# Altium footprint library PBL - SMD Packages.PcbLib: 148 footprints (part 8 of 10)
Each footprint in its own frame and in the unit in brackets; x right, y up, seen from the top. Pads: shape width x height; smd on the part's side, far side on the other; paste and mask are expansions set on the pad; w line width, h text height; cw(c..) or ccw(c..) is an arc to the next point about the centre after c.
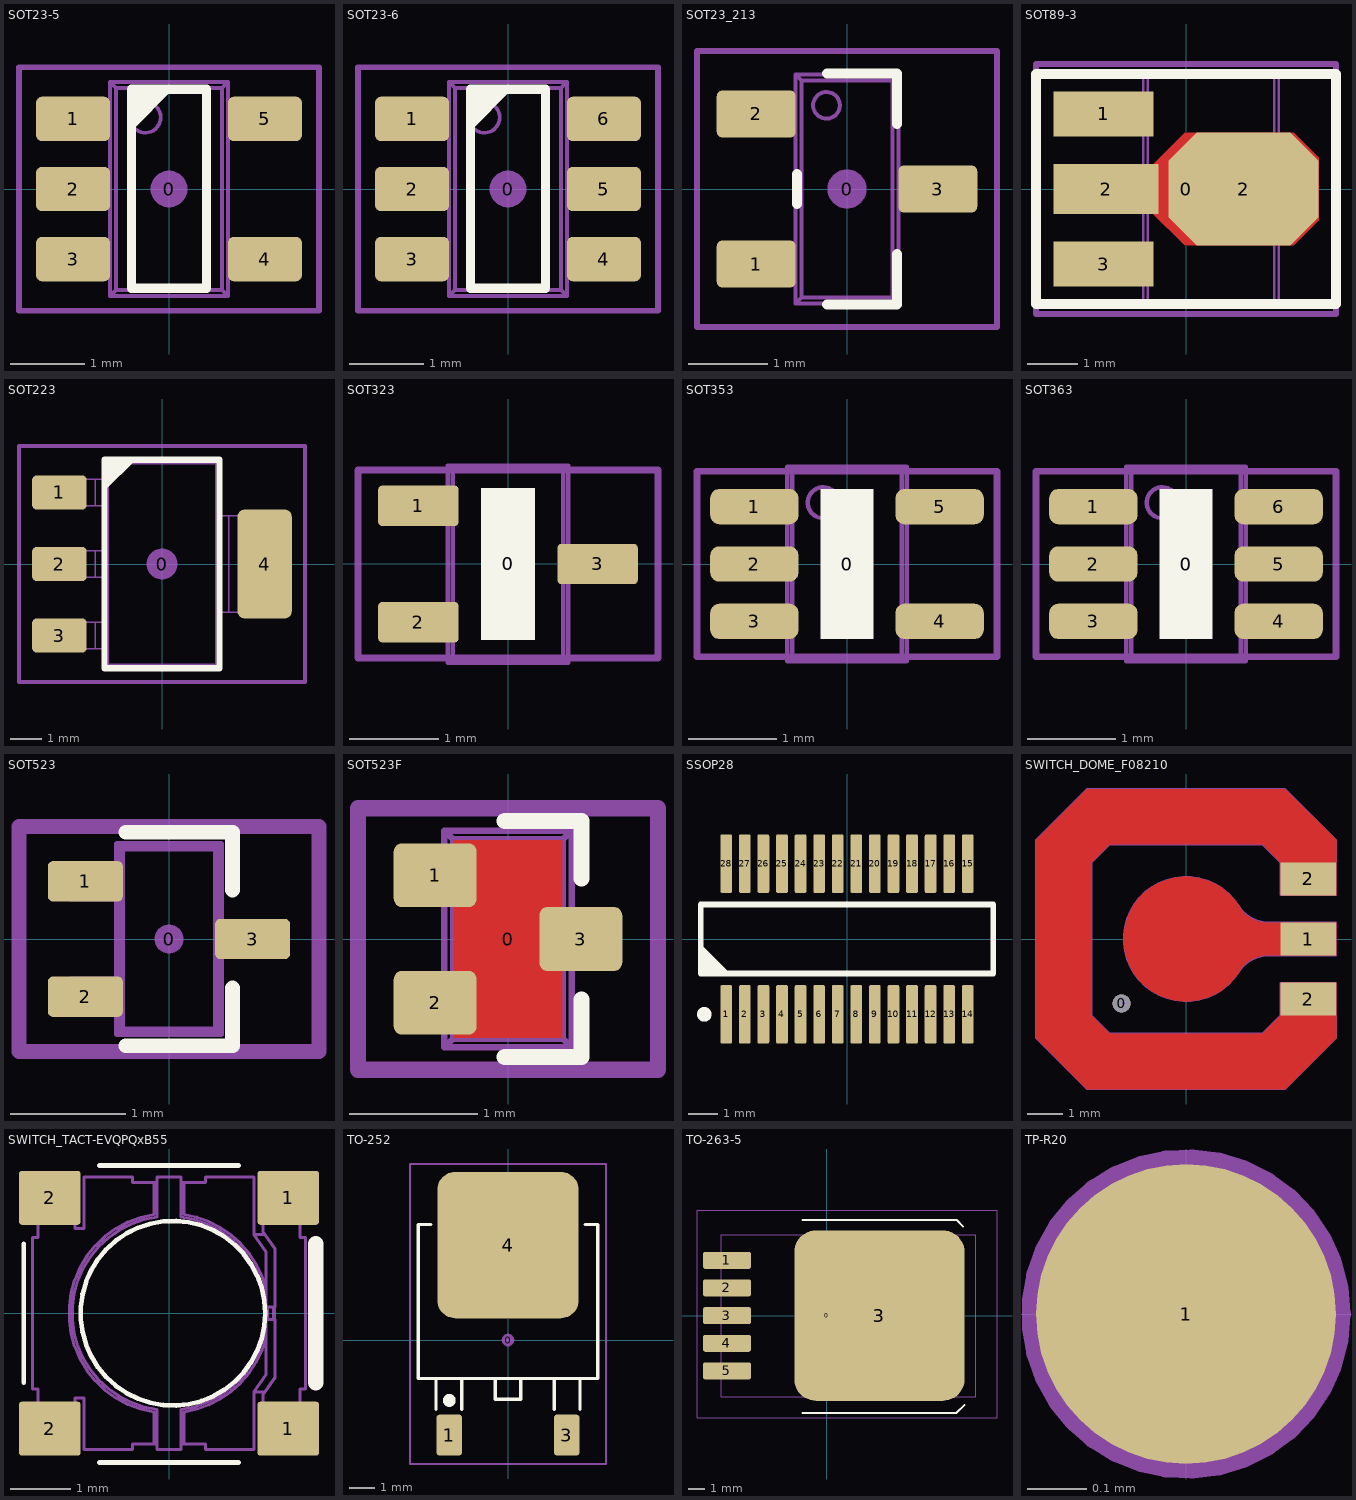
[diagram p7: the footprints below, top view; thin cyan lines are the x and y axes]

## SOT23-5 [mm]
height 1.6
pads (6):
  round 0.5 on Mech15: 0(0,0)
  rrect25% 1x0.6 smd: 1(-1.3,0.95) 2(-1.3,0) 3(-1.3,-0.95) 4(1.3,-0.95) 5(1.3,0.95)
Top Overlay:
  region: -0.508,1.353 0.053,1.353 -0.508,0.792
  lines w0.127: -0.508,-1.347 -0.508,1.353 0.508,1.353 0.508,-1.347 -0.508,-1.347
  text "." at -2.275,0.95 h0.1
13 - 3D Top Side:
  circle w0.05: c-0.32,0.97 r0.208
  lines w0.05: -1.191,-1.15 -1.191,-0.75 ; -1.191,-0.2 -1.191,0.2 ; -1.191,0.75 -1.191,1.15 ; -1.1,-1.15 -1.1,-0.75 ; -1.1,-0.2 -1.1,0.2 ; -1.1,0.75 -1.1,1.15 ; -1.094,-1.15 -1.094,-0.75 ; -1.094,-0.2 -1.094,0.2 ; -1.094,0.75 -1.094,1.15 ; -0.844,-1.15 -0.844,-0.75 ; -0.844,-0.2 -0.844,0.2 ; -0.844,0.75 -0.844,1.15 ; -0.8,-1.15 -1.4,-1.15 -1.4,-0.75 -0.8,-0.75 ; -0.8,-0.2 -1.4,-0.2 -1.4,0.2 -0.8,0.2 ; -0.8,0.75 -1.4,0.75 -1.4,1.15 -0.8,1.15 ; 0.8,-1.15 1.4,-1.15 1.4,-0.75 0.8,-0.75 ; 0.8,0.75 1.4,0.75 1.4,1.15 0.8,1.15 ; 0.844,-1.15 0.844,-0.75 ; 0.844,0.75 0.844,1.15 ; 1.094,-1.15 1.094,-0.75 ; 1.094,0.75 1.094,1.15 ; 1.1,-1.15 1.1,-0.75 ; 1.1,0.75 1.1,1.15 ; 1.191,-1.15 1.191,-0.75 ; 1.191,0.75 1.191,1.15 ; -0.8,-1.45 -0.8,1.45 ; -0.8,-1.45 -0.719,-1.369 ; -0.8,-1.45 0.8,-1.45 ; -0.8,1.45 -0.719,1.369 ; -0.8,1.45 0.8,1.45 ; -0.719,-1.369 0.719,-1.369 ; -0.719,-1.369 -0.719,1.369 ; -0.719,1.369 0.719,1.369 ; 0.719,-1.369 0.8,-1.45 ; 0.719,-1.369 0.719,1.369 ; 0.719,1.369 0.8,1.45 ; 0.8,-1.45 0.8,1.45
15 - Top Courtyards:
  lines w0.076: -2.032,-1.651 -2.032,1.651 2.032,1.651 2.032,-1.651 -2.032,-1.651
3D body: height 1.44, standoff -0.01, extent -1.4,-1.45 1.4,1.45

## SOT23-6 [mm]
height 1.6
pads (7):
  round 0.5 on Mech15: 0(0,0)
  rrect25% 1x0.6 smd: 1(-1.3,0.95) 2(-1.3,0) 3(-1.3,-0.95) 4(1.3,-0.95) 5(1.3,0) 6(1.3,0.95)
Top Overlay:
  region: -0.508,1.353 0.053,1.353 -0.508,0.792
  lines w0.127: -0.508,-1.347 -0.508,1.353 0.508,1.353 0.508,-1.347 -0.508,-1.347
  text "." at -2.275,0.95 h0.1
13 - 3D Top Side:
  circle w0.05: c-0.32,0.97 r0.208
  lines w0.05: -1.191,-1.15 -1.191,-0.75 ; -1.191,-0.2 -1.191,0.2 ; -1.191,0.75 -1.191,1.15 ; -1.1,-1.15 -1.1,-0.75 ; -1.1,-0.2 -1.1,0.2 ; -1.1,0.75 -1.1,1.15 ; -1.094,-1.15 -1.094,-0.75 ; -1.094,-0.2 -1.094,0.2 ; -1.094,0.75 -1.094,1.15 ; -0.844,-1.15 -0.844,-0.75 ; -0.844,-0.2 -0.844,0.2 ; -0.844,0.75 -0.844,1.15 ; -0.8,-1.15 -1.4,-1.15 -1.4,-0.75 -0.8,-0.75 ; -0.8,-0.2 -1.4,-0.2 -1.4,0.2 -0.8,0.2 ; -0.8,0.75 -1.4,0.75 -1.4,1.15 -0.8,1.15 ; 0.8,-1.15 1.4,-1.15 1.4,-0.75 0.8,-0.75 ; 0.8,-0.2 1.4,-0.2 1.4,0.2 0.8,0.2 ; 0.8,0.75 1.4,0.75 1.4,1.15 0.8,1.15 ; 0.844,-1.15 0.844,-0.75 ; 0.844,-0.2 0.844,0.2 ; 0.844,0.75 0.844,1.15 ; 1.094,-1.15 1.094,-0.75 ; 1.094,-0.2 1.094,0.2 ; 1.094,0.75 1.094,1.15 ; 1.1,-1.15 1.1,-0.75 ; 1.1,-0.2 1.1,0.2 ; 1.1,0.75 1.1,1.15 ; 1.191,-1.15 1.191,-0.75 ; 1.191,-0.2 1.191,0.2 ; 1.191,0.75 1.191,1.15 ; -0.8,-1.45 0.8,-1.45 ; -0.8,-1.45 -0.719,-1.369 ; -0.8,-1.45 -0.8,1.45 ; -0.8,1.45 0.8,1.45 ; -0.8,1.45 -0.719,1.369 ; -0.719,-1.369 -0.719,1.369 ; -0.719,-1.369 0.719,-1.369 ; -0.719,1.369 0.719,1.369 ; 0.719,-1.369 0.719,1.369 ; 0.719,-1.369 0.8,-1.45 ; 0.719,1.369 0.8,1.45 ; 0.8,-1.45 0.8,1.45
15 - Top Courtyards:
  lines w0.076: -2.032,-1.651 -2.032,1.651 2.032,1.651 2.032,-1.651 -2.032,-1.651
3D body: height 1.44, standoff -0.01, extent -1.4,-1.45 1.4,1.45

## SOT23_213 [mm]
height 1.003
pads (4):
  round 0.5 on Mech15: 0(0,0)
  rrect25% 1x0.6 smd: 1(-1.15,-0.95) 2(-1.15,0.95) 3(1.15,0)
Top Overlay:
  lines w0.127: -0.635,-0.191 -0.635,0.191 ; -0.254,-1.46 0.635,-1.46 0.635,-0.826 ; -0.254,1.46 0.635,1.46 0.635,0.826
13 - 3D Top Side:
  circle w0.05: c-0.26,1.06 r0.169
  lines w0.05: -1.19,-1.19 -1.19,-0.71 ; -1.19,0.71 -1.19,1.19 ; -1.099,-1.19 -1.099,-0.71 ; -1.099,0.71 -1.099,1.19 ; -1.074,-1.19 -1.074,-0.71 ; -1.074,0.71 -1.074,1.19 ; -0.825,-1.19 -0.825,-0.71 ; -0.825,0.71 -0.825,1.19 ; -0.65,-1.19 -1.4,-1.19 -1.4,-0.71 -0.65,-0.71 ; -0.65,0.71 -1.4,0.71 -1.4,1.19 -0.65,1.19 ; 0.65,-0.24 1.4,-0.24 1.4,0.24 0.65,0.24 ; 0.825,-0.24 0.825,0.24 ; 1.074,-0.24 1.074,0.24 ; 1.099,-0.24 1.099,0.24 ; 1.19,-0.24 1.19,0.24 ; -0.65,-1.45 -0.576,-1.376 ; -0.65,-1.45 -0.65,1.45 ; -0.65,-1.45 0.65,-1.45 ; -0.65,1.45 0.65,1.45 ; -0.65,1.45 -0.576,1.376 ; -0.576,-1.376 -0.576,1.376 ; -0.576,-1.376 0.576,-1.376 ; -0.576,1.376 0.576,1.376 ; 0.576,-1.376 0.576,1.376 ; 0.576,-1.376 0.65,-1.45 ; 0.576,1.376 0.65,1.45 ; 0.65,-1.45 0.65,1.45
15 - Top Courtyards:
  lines w0.076: -1.9,-1.75 -1.9,1.75 1.9,1.75 1.9,-1.75 -1.9,-1.75
3D body: height 1.29, standoff -0.01, extent -1.4,-1.45 1.4,1.45

## SOT89-3 [mm] "JEDEC TO-243 option AA / SOT89"
height 1.7
pads (5):
  round 1 on Mech15: 0(0,0)
  rrect1% 2x0.9 smd: 1(-1.65,1.5) 3(-1.65,-1.5)
  rrect1% 2.1x1 smd: 2(-1.6,0)
  oct 3x2.25 smd: 2(1.15,0)
Top Layer:
  region: -0.7,-0.45 -0.025,-1.125 2.15,-1.125 2.65,-0.625 2.65,0.625 2.15,1.125 -0.025,1.125 -0.7,0.45
Top Overlay:
  lines w0.2: -3,-2.3 -3,2.3 3,2.3 3,-2.3 -3,-2.3
13 - 3D Top Side:
  lines w0.05: -0.85,-1.76 -0.85,-2.35 ; -0.85,-1.24 -0.85,-0.3 ; -0.85,0.3 -0.85,1.24 ; -0.85,1.76 -0.85,2.35 ; 1.85,-0.925 1.85,-2.35 ; 1.85,0.925 1.85,2.35 ; -0.85,-2.35 1.85,-2.35 ; -0.85,-2.35 -0.761,-2.261 ; -0.85,2.35 1.85,2.35 ; -0.85,2.35 -0.761,2.261 ; -0.761,-2.261 1.761,-2.261 ; -0.761,-2.261 -0.761,2.261 ; -0.761,2.261 1.761,2.261 ; 1.761,-2.261 1.761,2.261 ; 1.761,-2.261 1.85,-2.35 ; 1.761,2.261 1.85,2.35 ; -2.25,-1.76 -2.25,-1.24 -0.824,-1.24 -0.824,-1.76 -2.25,-1.76 ; -2.25,-0.3 -0.824,-0.3 -0.824,0.3 -2.25,0.3 -2.25,-0.3 ; -2.25,1.24 -2.25,1.76 -0.824,1.76 -0.824,1.24 -2.25,1.24 ; 1.824,-0.925 1.9,-0.925 2.2,-0.625 2.2,0.625 1.9,0.925 1.824,0.925 1.824,-0.925
15 - Top Courtyards:
  lines w0.127: -3,-2.5 -3,2.5 3,2.5 3,-2.5 -3,-2.5
3D body: height 1.69, standoff 0, extent -2.25,-2.35 2.2,2.35

## SOT223 [mm] "SOT223 /SC-73"
height 1.524
pads (5):
  round 1 on Mech15: 0(0,0)
  rrect25% 1.75x1.1 smd: 1(-3.3,2.3) 2(-3.3,0) 3(-3.3,-2.3)
  rrect25% 1.75x3.5 smd: 4(3.3,0)
Top Overlay:
  region: -1.85,3.35 -0.85,3.35 -1.85,2.35
  lines w0.2: -1.85,-3.35 1.85,-3.35 1.85,3.35 -1.85,3.35 -1.85,-3.35
13 - 3D Top Side:
  lines w0.05: -3.186,-2.72 -3.186,-1.88 ; -3.186,-0.42 -3.186,0.42 ; -3.186,1.88 -3.186,2.72 ; -3.062,-2.72 -3.062,-1.88 ; -3.062,-0.42 -3.062,0.42 ; -3.062,1.88 -3.062,2.72 ; -2.506,-2.72 -2.506,-1.88 ; -2.506,-0.42 -2.506,0.42 ; -2.506,1.88 -2.506,2.72 ; -2.152,-2.72 -2.152,-1.88 ; -2.152,-0.42 -2.152,0.42 ; -2.152,1.88 -2.152,2.72 ; -1.85,-2.72 -1.85,-3.35 ; -1.85,-1.88 -1.85,-0.42 ; -1.85,0.42 -1.85,1.88 ; -1.85,2.72 -1.85,3.35 ; 1.85,-1.55 1.85,-3.35 ; 1.85,1.55 1.85,3.35 ; 2.152,-1.55 2.152,1.55 ; 2.506,-1.55 2.506,1.55 ; 3.062,-1.55 3.062,1.55 ; 3.186,-1.55 3.186,1.55 ; -1.85,-3.35 1.85,-3.35 ; -1.85,-3.35 -1.731,-3.231 ; -1.85,3.35 1.85,3.35 ; -1.85,3.35 -1.731,3.231 ; -1.731,-3.231 -1.731,3.231 ; -1.731,-3.231 1.731,-3.231 ; -1.731,3.231 1.731,3.231 ; 1.731,-3.231 1.731,3.231 ; 1.731,-3.231 1.85,-3.35 ; 1.731,3.231 1.85,3.35 ; -3.65,-2.72 -1.829,-2.72 -1.829,-1.88 -3.65,-1.88 -3.65,-2.72 ; -3.65,-0.42 -1.829,-0.42 -1.829,0.42 -3.65,0.42 -3.65,-0.42 ; -3.65,1.88 -1.829,1.88 -1.829,2.72 -3.65,2.72 -3.65,1.88 ; 1.829,-1.55 1.829,1.55 3.65,1.55 3.65,-1.55 1.829,-1.55
15 - Top Courtyards:
  lines w0.127: -4.6,-3.8 4.6,-3.8 4.6,3.8 -4.6,3.8 -4.6,-3.8
3D body: height 1.8, standoff 0, extent -3.65,-3.35 3.65,3.35

## SOT323 [mm] "Small outline 2.1mm L x 1.25mm W x 1.1mm H; 3 lead SC70, EIAJ SC-70, SOT323"
height 1.1
pads (4):
  round 0.5 on Mech15: 0(0,0)
  rrect20% 0.9x0.45 smd: 1(-1,0.65) 2(-1,-0.65) 3(1,0)
Top Overlay:
  rectangle: -0.3,-0.85 0.3,0.85
  text "." at -1.875,0.65 h0.1
13 - 3D Top Side:
  lines w0.05: -1.028,-0.8 -1.028,-0.5 ; -1.028,0.5 -1.028,0.8 ; -0.937,-0.8 -0.937,-0.5 ; -0.937,0.5 -0.937,0.8 ; -0.925,-0.8 -0.925,-0.5 ; -0.925,0.5 -0.925,0.8 ; 0.925,-0.15 0.925,0.15 ; 0.937,-0.15 0.937,0.15 ; 1.028,-0.15 1.028,0.15 ; -0.675,-1.1 0.675,-1.1 ; -0.675,-1.1 -0.675,1.1 ; -0.675,-1.1 -0.619,-1.044 ; -0.675,1.1 0.675,1.1 ; -0.675,1.1 -0.619,1.043 ; -0.619,-1.044 0.619,-1.044 ; -0.619,-1.044 -0.619,1.043 ; -0.619,1.043 0.619,1.043 ; 0.619,-1.044 0.675,-1.1 ; 0.619,-1.044 0.619,1.043 ; 0.619,1.043 0.675,1.1 ; 0.675,-1.1 0.675,1.1 ; -1.2,-0.8 -1.2,-0.5 -0.654,-0.5 -0.654,-0.8 -1.2,-0.8 ; -1.2,0.5 -1.2,0.8 -0.654,0.8 -0.654,0.5 -1.2,0.5 ; 0.654,-0.15 1.2,-0.15 1.2,0.15 0.654,0.15 0.654,-0.15
15 - Top Courtyards:
  lines w0.076: -1.675,-1.05 -1.675,1.05 1.675,1.05 1.675,-1.05 -1.675,-1.05
3D body: height 1.1, standoff 0, extent -1.2,-1.1 1.2,1.1

## SOT353 [mm] "Small outline 2.1mm L x 1.25mm W x 1mm H; 5LD SC-70; SC-88A"
height 1.1
pads (6):
  round 0.5 on Mech15: 0(0,0)
  rrect50% 1x0.4 smd: 1(-1.05,0.65) 2(-1.05,0) 3(-1.05,-0.65) 4(1.05,-0.65) 5(1.05,0.65)
Top Overlay:
  rectangle: -0.3,-0.85 0.3,0.85
  text "." at -2.025,0.65 h0.1
Top Solder:
  rectangle: -1.397,-0.762 -0.635,0.762
13 - 3D Top Side:
  circle w0.05: c-0.27,0.695 r0.175
  lines w0.05: -1.028,-0.8 -1.028,-0.5 ; -1.028,-0.15 -1.028,0.15 ; -1.028,0.5 -1.028,0.8 ; -0.937,-0.8 -0.937,-0.5 ; -0.937,-0.15 -0.937,0.15 ; -0.937,0.5 -0.937,0.8 ; -0.925,-0.8 -0.925,-0.5 ; -0.925,-0.15 -0.925,0.15 ; -0.925,0.5 -0.925,0.8 ; 0.925,-0.8 0.925,-0.5 ; 0.925,0.5 0.925,0.8 ; 0.937,-0.8 0.937,-0.5 ; 0.937,0.5 0.937,0.8 ; 1.028,-0.8 1.028,-0.5 ; 1.028,0.5 1.028,0.8 ; -0.675,-1.1 0.675,-1.1 ; -0.675,-1.1 -0.675,1.1 ; -0.675,-1.1 -0.619,-1.044 ; -0.675,1.1 0.675,1.1 ; -0.675,1.1 -0.619,1.044 ; -0.619,-1.044 0.619,-1.044 ; -0.619,-1.044 -0.619,1.044 ; -0.619,1.044 0.619,1.044 ; 0.619,-1.044 0.675,-1.1 ; 0.619,-1.044 0.619,1.044 ; 0.619,1.044 0.675,1.1 ; 0.675,-1.1 0.675,1.1 ; -1.2,-0.8 -1.2,-0.5 -0.654,-0.5 -0.654,-0.8 -1.2,-0.8 ; -1.2,-0.15 -1.2,0.15 -0.654,0.15 -0.654,-0.15 -1.2,-0.15 ; -1.2,0.5 -1.2,0.8 -0.654,0.8 -0.654,0.5 -1.2,0.5 ; 0.654,-0.8 1.2,-0.8 1.2,-0.5 0.654,-0.5 0.654,-0.8 ; 0.654,0.5 1.2,0.5 1.2,0.8 0.654,0.8 0.654,0.5
15 - Top Courtyards:
  lines w0.076: -1.7,-1.05 1.7,-1.05 1.7,1.05 -1.7,1.05 -1.7,-1.05
3D body: height 1.1, standoff 0, extent -1.2,-1.1 1.2,1.1

## SOT363 [mm] "Small outline 2.1mm L x 1.25mm W x 1mm H"
height 1
pads (7):
  round 0.5 on Mech15: 0(0,0)
  rrect50% 1x0.4 smd: 1(-1.05,0.65) 2(-1.05,0) 3(-1.05,-0.65) 4(1.05,-0.65) 5(1.05,0) 6(1.05,0.65)
Top Overlay:
  rectangle: -0.3,-0.85 0.3,0.85
  text "." at -2.025,0.65 h0.1
Top Solder:
  region: 1.397,0.762 0.635,0.762 0.635,-0.762 1.397,-0.762
  rectangle: -1.397,-0.762 -0.635,0.762
13 - 3D Top Side:
  circle w0.05: c-0.27,0.695 r0.175
  lines w0.05: -1.028,-0.8 -1.028,-0.5 ; -1.028,-0.15 -1.028,0.15 ; -1.028,0.5 -1.028,0.8 ; -0.937,-0.8 -0.937,-0.5 ; -0.937,-0.15 -0.937,0.15 ; -0.937,0.5 -0.937,0.8 ; -0.925,-0.8 -0.925,-0.5 ; -0.925,-0.15 -0.925,0.15 ; -0.925,0.5 -0.925,0.8 ; 0.925,-0.8 0.925,-0.5 ; 0.925,-0.15 0.925,0.15 ; 0.925,0.5 0.925,0.8 ; 0.937,-0.8 0.937,-0.5 ; 0.937,-0.15 0.937,0.15 ; 0.937,0.5 0.937,0.8 ; 1.028,-0.8 1.028,-0.5 ; 1.028,-0.15 1.028,0.15 ; 1.028,0.5 1.028,0.8 ; -0.675,-1.1 -0.619,-1.044 ; -0.675,-1.1 -0.675,1.1 ; -0.675,-1.1 0.675,-1.1 ; -0.675,1.1 -0.619,1.044 ; -0.675,1.1 0.675,1.1 ; -0.619,-1.044 -0.619,1.044 ; -0.619,-1.044 0.619,-1.044 ; -0.619,1.044 0.619,1.044 ; 0.619,-1.044 0.619,1.044 ; 0.619,-1.044 0.675,-1.1 ; 0.619,1.044 0.675,1.1 ; 0.675,-1.1 0.675,1.1 ; -1.2,-0.8 -0.654,-0.8 -0.654,-0.5 -1.2,-0.5 -1.2,-0.8 ; -1.2,-0.15 -0.654,-0.15 -0.654,0.15 -1.2,0.15 -1.2,-0.15 ; -1.2,0.5 -0.654,0.5 -0.654,0.8 -1.2,0.8 -1.2,0.5 ; 0.654,-0.8 0.654,-0.5 1.2,-0.5 1.2,-0.8 0.654,-0.8 ; 0.654,-0.15 0.654,0.15 1.2,0.15 1.2,-0.15 0.654,-0.15 ; 0.654,0.5 0.654,0.8 1.2,0.8 1.2,0.5 0.654,0.5
15 - Top Courtyards:
  lines w0.076: -1.7,-1.05 1.7,-1.05 1.7,1.05 -1.7,1.05 -1.7,-1.05
3D body: height 1.1, standoff 0, extent -1.2,-1.1 1.2,1.1

## SOT523 [mm] "3 Lead SC75; EIAJ-SC75; SOT523; SOT416?"
height 0.9
pads (4):
  round 0.254 on Mech15: 0(0,0)
  rrect25% 0.65x0.35 smd: 1(-0.725,0.5) 2(-0.725,-0.5) 3(0.725,0)
Top Overlay:
  lines w0.127: -0.375,-0.925 0.55,-0.925 0.55,-0.425 ; -0.375,0.925 0.55,0.925 0.55,0.425
  text "." at -1.455,0.5 h0.05
13 - 3D Top Side:
  lines w0.05: -0.669,-0.65 -0.669,-0.35 ; -0.669,0.35 -0.669,0.65 ; -0.623,-0.65 -0.623,-0.35 ; -0.623,0.35 -0.623,0.65 ; -0.61,-0.65 -0.61,-0.35 ; -0.61,0.35 -0.61,0.65 ; 0.61,-0.15 0.61,0.15 ; 0.623,-0.15 0.623,0.15 ; 0.669,-0.15 0.669,0.15 ; -0.45,-0.825 0.45,-0.825 ; -0.45,-0.825 -0.45,0.825 ; -0.45,-0.825 -0.408,-0.783 ; -0.45,0.825 0.45,0.825 ; -0.45,0.825 -0.408,0.783 ; -0.408,-0.783 0.408,-0.783 ; -0.408,-0.783 -0.408,0.783 ; -0.408,0.783 0.408,0.783 ; 0.408,-0.783 0.45,-0.825 ; 0.408,-0.783 0.408,0.783 ; 0.408,0.783 0.45,0.825 ; 0.45,-0.825 0.45,0.825 ; -0.85,-0.65 -0.85,-0.35 -0.429,-0.35 -0.429,-0.65 -0.85,-0.65 ; -0.85,0.35 -0.85,0.65 -0.429,0.65 -0.429,0.35 -0.85,0.35 ; 0.429,-0.15 0.85,-0.15 0.85,0.15 0.429,0.15 0.429,-0.15
15 - Top Courtyards:
  lines w0.127: -1.3,-0.975 1.3,-0.975 1.3,0.975 -1.3,0.975 -1.3,-0.975
3D body: height 0.9, standoff 0, extent -0.85,-0.825 0.85,0.825

## SOT523F [mm] "3 Lead SC89; EIAJ-SC89; SOT523F"
height 0.8
pads (4):
  round 0.254 on Mech15: 0(0,0)
  rrect25% 0.65x0.5 smd: 1(-0.57,0.5) 2(-0.57,-0.5) 3(0.57,0)
Top Layer:
  pour cut-out: -0.425,0.775 0.425,0.775 0.425,-0.775 -0.425,-0.775
Top Overlay:
  lines w0.127: -0.025,-0.925 0.575,-0.925 0.575,-0.475 ; -0.025,0.925 0.575,0.925 0.575,0.475
  text "." at -1.3,0.5 h0.05
13 - 3D Top Side:
  lines w0.05: -0.499,-0.675 -0.499,-0.849 ; -0.499,-0.325 -0.499,0.325 ; -0.499,0.675 -0.499,0.849 ; 0.499,-0.175 0.499,-0.849 ; 0.499,0.175 0.499,0.849 ; -0.499,-0.849 0.499,-0.849 ; -0.499,-0.849 -0.43,-0.78 ; -0.499,0.849 0.499,0.849 ; -0.499,0.849 -0.43,0.78 ; -0.43,-0.78 0.43,-0.78 ; -0.43,-0.78 -0.43,0.78 ; -0.43,0.78 0.43,0.78 ; 0.43,-0.78 0.43,0.78 ; 0.43,-0.78 0.499,-0.849 ; 0.43,0.78 0.499,0.849 ; -0.85,-0.675 -0.85,-0.325 -0.483,-0.325 -0.483,-0.675 -0.85,-0.675 ; -0.85,0.325 -0.85,0.675 -0.483,0.675 -0.483,0.325 -0.85,0.325 ; 0.483,-0.175 0.85,-0.175 0.85,0.175 0.483,0.175 0.483,-0.175
15 - Top Courtyards:
  lines w0.127: -1.175,-1.025 1.175,-1.025 1.175,1.025 -1.175,1.025 -1.175,-1.025
3D body: height 0.8, standoff 0, extent -0.85,-0.849 0.85,0.849

## SSOP28 [mm] "SSOP; 28 Leads; Body Width 3.9 mm; Pitch 0.635 mm"
height 1.75
pads (28):
  rrect25% 0.4x2 smd: 1(-4.127,-2.575) 2(-3.492,-2.575) 3(-2.857,-2.575) 4(-2.222,-2.575) 5(-1.587,-2.575) 6(-0.953,-2.575) 7(-0.318,-2.575) 8(0.318,-2.575) 9(0.953,-2.575) 10(1.587,-2.575) 11(2.222,-2.575) 12(2.857,-2.575) 13(3.492,-2.575) 14(4.127,-2.575) 15(4.127,2.575) 16(3.492,2.575) 17(2.857,2.575) 18(2.222,2.575) 19(1.587,2.575) 20(0.953,2.575) 21(0.318,2.575) 22(-0.318,2.575) 23(-0.953,2.575) 24(-1.587,2.575) 25(-2.222,2.575) 26(-2.857,2.575) 27(-3.492,2.575) 28(-4.127,2.575)
Top Overlay:
  circle w0.25: c-4.878,-2.575 r0.125
  region: -5,-1.175 -5,-0.175 -4,-1.175
  lines w0.2: -5,-1.175 5,-1.175 5,1.175 -5,1.175 -5,-1.175

## SWITCH_DOME_F08210 [mm] "Snaptron F08210 dome switch"
height 0.5
pads (4):
  round 0.508 hole 0.508 unplated: 0(-1.8,-1.8)
  rect 1.55x0.92 smd paste-0.8: 1(3.415,0) 2(3.415,-1.68) 2(3.415,1.68)
Top Layer:
  region: -2.77,-4.19 -4.19,-2.77 -4.19,2.77 -2.77,4.19 2.77,4.19 4.19,2.77 4.19,1.22 2.64,1.22 2.64,2.128 2.128,2.64 -2.128,2.64 -2.64,2.128 -2.64,-2.128 -2.128,-2.64 2.128,-2.64 2.64,-2.128 2.64,-1.22 4.19,-1.22 4.19,-2.77 2.77,-4.19
  region: 1.476,-0.93 1.454,-0.971 1.236,-1.236 0.971,-1.454 0.669,-1.615 0.341,-1.715 0,-1.748 -0.341,-1.715 -0.669,-1.615 -0.971,-1.454 -1.236,-1.236 -1.454,-0.971 -1.615,-0.669 -1.715,-0.341 -1.748,0 -1.715,0.341 -1.615,0.669 -1.454,0.971 -1.236,1.236 -0.971,1.454 -0.669,1.615 -0.341,1.715 0,1.748 0.341,1.715 0.669,1.615 0.971,1.454 1.236,1.236 1.454,0.971 1.476,0.93 1.469,0.925 1.605,0.747 1.814,0.587 2.058,0.486 2.319,0.451 2.319,0.46 4.19,0.46 4.19,-0.46 2.319,-0.451 2.058,-0.486 1.814,-0.587 1.605,-0.747 1.469,-0.925
Mechanical 3:
  lines w0.05: -4.19,-2.77 -4.19,2.77 -2.77,4.19 2.77,4.19 4.19,2.77 4.19,1.22 2.64,1.22 2.64,2.128 2.128,2.64 -2.128,2.64 -2.64,2.128 -2.64,-2.128 -2.128,-2.64 2.128,-2.64 2.64,-2.128 2.64,-1.22 4.19,-1.22 4.19,-2.77 2.77,-4.19 -2.77,-4.19 -4.19,-2.77 ; 1.472,-0.927 cw(c0,0) 1.472,0.927 ccw(c2.319,1.46) 2.319,0.46 4.19,0.46 4.19,-0.46 2.319,-0.46 ccw(c2.319,-1.46) 1.472,-0.927
3D body: height 0.48, standoff 0, extent -3.546,-3.546 3.546,3.546

## SWITCH_TACT-EVQPQxB55 [mil] "Panasonic SMD tact switch 4.5x4.5x0.55mm, EVQPQxB55"
height 21.65
pads (4):
  rrect10% 40x35 smd: 1(77.5,-75) 1(77.5,75) 2(-77.5,-75) 2(-77.5,75)
Top Overlay:
  circle w3: c2.5,0 r60
  lines w3: -94.5,-45.28 -94.5,45.28 ; -45.28,-97 45.28,-97 ; -45.28,96 45.28,96
  lines w10: 95.5,-45.28 95.5,45.28
13 - 3D Top Side:
  lines w1.97: -85.04,-84.12 -61.02,-84.12 ; -85.04,-79.15 -61.02,-79.15 ; -85.04,-77.22 -61.02,-77.22 ; -85.04,-68.45 -61.02,-68.45 ; -85.04,-66.52 -61.02,-66.52 ; -85.04,-62.25 -61.02,-62.25 ; -85.04,-58.68 -61.02,-58.68 ; -85.04,58.68 -61.02,58.68 ; -85.04,62.25 -61.02,62.25 ; -85.04,66.52 -61.02,66.52 ; -85.04,68.45 -61.02,68.45 ; -85.04,77.22 -61.02,77.22 ; -85.04,79.15 -61.02,79.15 ; -85.04,84.12 -61.02,84.12 ; -9.84,-85.04 -9.84,-64.21 cw(c0,0) -9.84,64.21 -9.84,85.04 ; -7.87,-85.04 -23.62,-85.04 -23.62,-88.58 -55.12,-88.58 -55.12,-55.12 -61.02,-55.12 -61.02,-86.61 -85.04,-86.61 -85.04,-49.21 -88.58,-49.21 -88.58,49.21 -85.04,49.21 -85.04,86.61 -61.02,86.61 -61.02,55.12 -55.12,55.12 -55.12,88.58 -23.62,88.58 -23.62,85.04 -7.87,85.04 ; -7.87,-62.5 -7.87,-88.58 7.87,-88.58 7.87,-62.5 ; -7.87,62.5 -7.87,88.58 7.87,88.58 7.87,62.5 ; -7.81,-62.51 cw(c0,0) -7.81,62.51 ; 7.81,-62.51 ccw(c0,0) 7.81,62.51 ; 7.87,-85.04 23.62,-85.04 23.62,-88.58 55.12,-88.58 55.12,-51.29 62.99,-40.04 62.99,40.04 55.12,51.29 55.12,88.58 23.62,88.58 23.62,85.04 7.87,85.04 ; 9.84,-85.04 9.84,-64.21 ccw(c0,0) 62.99,-15.87 ; 9.84,85.04 9.84,64.21 cw(c0,0) 62.99,15.87 ; 55.19,-51.18 62.4,-51.18 ; 55.19,51.18 62.4,51.18 ; 61.02,-84.12 85.04,-84.12 ; 61.02,-79.15 85.04,-79.15 ; 61.02,-77.22 85.04,-77.22 ; 61.02,-68.45 85.04,-68.45 ; 61.02,-66.52 85.04,-66.52 ; 61.02,-62.25 85.04,-62.25 ; 61.02,-58.68 85.04,-58.68 ; 61.02,58.68 85.04,58.68 ; 61.02,62.25 85.04,62.25 ; 61.02,66.52 85.04,66.52 ; 61.02,68.45 85.04,68.45 ; 61.02,77.22 85.04,77.22 ; 61.02,79.15 85.04,79.15 ; 61.02,84.12 85.04,84.12 ; 64.09,-3.94 64.09,3.94 ; 67.8,-3.94 67.8,3.94 ; 68.44,-3.94 68.44,3.94 ; 61.02,-86.61 85.04,-86.61 85.04,-49.21 88.58,-49.21 88.58,49.21 85.04,49.21 85.04,86.61 61.02,86.61 61.02,53.15 68.9,41.9 68.9,3.94 63.45,3.94 63.45,-3.94 68.9,-3.94 68.9,-41.9 61.02,-53.15 61.02,-86.61
3D body: height 21.65, standoff 0, extent -88.57,-88.58 88.59,88.59

## TO-252 [mm] "D-PAK/TO-252-AA; 3 Leads (1 Cropped); Body 10.3 (inc. leads) x 6.7 mm (LxW max)"
height 2.38
pads (4):
  round 0.5 on Mech15: 0(0,0)
  rrect25% 1x1.6 smd: 1(-2.285,-3.7) 3(2.285,-3.7)
  rrect25% 5.5x5.7 smd: 4(0,3.7)
Top Overlay:
  circle w0.25: c-2.285,-2.35 r0.125
  lines w0.127: -3,4.5 -3.5,4.5 -3.5,-1.5 3.5,-1.5 3.5,4.5 3,4.5 ; -2.8,-2.7 -2.8,-1.5 -1.8,-1.5 -1.8,-2.7 ; 1.8,-2.7 1.8,-1.5 2.8,-1.5 2.8,-2.7 ; -0.5,-2.3 -0.5,-1.5 0.5,-1.5 0.5,-2.3 -0.5,-2.3
15 - Top Courtyards:
  lines w0.076: -3.81,-4.826 -3.81,6.858 3.81,6.858 3.81,-4.826 -3.81,-4.826
3D body: height 2.31, standoff 0, extent -3.3,-3.951 3.3,5.762

## TO-263-5 [mm] "D-PAK/TO-263-5; 5 Leads; Body 14.4 (inc. leads) x 10.4 mm (LxW max)"
height 4.65
pads (7):
  round 0.5 on Mech15: 0(0,0)
  rrect25% 2.95x1.05 smd: 1(-6.15,3.41) 2(-6.15,1.705) 3(-6.15,0) 4(-6.15,-1.705) 5(-6.15,-3.41)
  rrect25% 10.5x10.5 smd: 3(3.25,0)
Top Overlay:
  lines w0.127: -1.5,-6 8,-6 8.5,-5.5 ; -1.5,5.9 8,5.9 8.4,5.5
13 - 3D Top Side:
  lines w0.076: -6.49,-5 -6.49,5 9.18,5 9.18,-5 -6.49,-5
15 - Top Courtyards:
  lines w0.076: -8,-6.3 -8,6.5 10.5,6.5 10.5,-6.3 -8,-6.3
3D body: height 4.56, standoff 0, extent -6.727,-5.08 7.288,5.08

## TP-R20 [mil]
pads (1):
  round 20 smd paste-30 mask+3: 1(0,0)
13 - 3D Top Side:
  circle w1.97: c0,0 r10
3D body: height -3, standoff -5, extent -10.91,-10.98 11,10.98